# Altium schematic symbol library LDO - TLV75533PDBVR.SchLib: 1 symbol
Pins are listed as number, name and electrical type; pins without a type are passive.

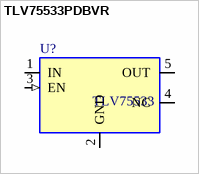
[diagram p0: symbol TLV75533PDBVR]

## TLV75533PDBVR
designator U?, comment TLV75533
Linear Voltage Regulator IC Positive Fixed 1 Output 500mA SOT-23-5; Manufacturer: Texas Instruments; Manufacturer Part Number: TLV75533PDBVR; Supplier 1: DigiKey; Supplier Part Number 1: 296-50411-1-ND; Supplier 2: LCSC; Supplier Part Number 2: C404027; Category: Voltage Regulators - Linear, Low Drop Out (LDO) Regulators; Case/Package: SC-74A, SOT-753; Supplier Device Package: SOT-23-5; Operating Temperature: -40°C ~ 125°C (TJ); Lifecycle Status: Active; ComponentLink1Description: Datasheet; ComponentLink1URL: https://www.ti.com/lit/ds/symlink/tlv755p.pdf; ComponentLink2Description: DigiKey; ComponentLink2URL: https://www.digikey.com/en/products/result?keywords=TLV75533PDBVR
footprint SOT-23-5 - TI (Huella SOT-23-5 - TI)
pins: 1 IN (power), 2 GND (power), 3 EN (in), 4 NC, 5 OUT (power)